# Altium schematic symbol library Chris_R.SchLib: 94 symbols (part 2 of 3)
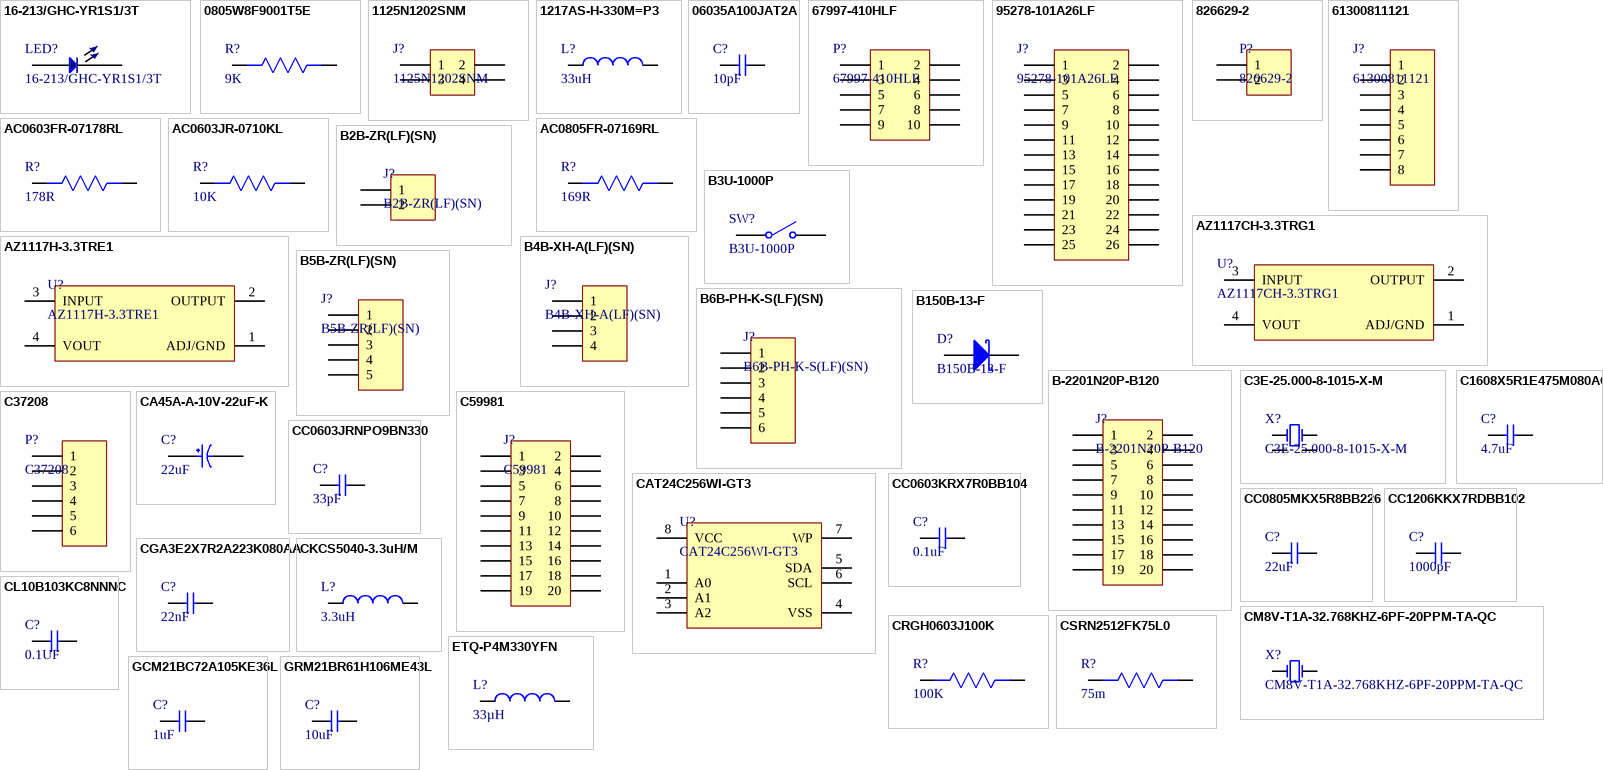
[diagram p3: symbols 16-213/GHC-YR1S1/3T to GRM21BR61H106ME43L]

## GCM21BC72A105KE36L
designator C?, comment 1uF
CAP CER 1UF 100V X7S 0805; Manufacturer: Murata; Manufacturer Part Number: GCM21BC72A105KE36L; Tolerance: 10%; Supplier 1: Digi-Key; RoHS: Yes; Category: Ceramic Capacitors; Stock 1: 179138; Pricing 1: 1=0.48000, 10=0.34100, 50=0.25800, 100=0.22480, 500=0.16650, 1000=0.14152 (USD); Mount: Surface Mount; Case/Package: 0805; Case Code (Imperial): 0805; Case Code (Metric): 2012; Min Operating Temperature: -55°C; Max Operating Temperature: 125°C; Packaging: Cut Tape; Capacitance: 1uF; Voltage Rating: 100V; Ratings: AEC-Q200; RoHS Compliant: Yes; ComponentLink1URL: http://search.murata.co.jp/Ceramy/image/img/A01X/partnumbering_e_02.pdf?src-supplier=Digi-Key; ComponentLink1Description: http://search.murata.co.jp/Ceramy/image/img/A01X/partnumbering_e_02.pdf?src-supplier=Digi-Key; Supplier Part Number 1: 490-14436-1-ND
footprint Cap0805 (SMD 0805)
pins: 1, 2

## GRM21BR61H106ME43L
designator C?, comment 10uF
CAP CER 10UF 50V X5R 0805; Manufacturer: Murata; Manufacturer Part Number: GRM21BR61H106ME43L; Supplier 1: Digi-Key; RoHS: Yes; Category: Ceramic Capacitors; Stock 1: 26; Pricing 1: 1=0.44000, 10=0.30700, 50=0.21500, 100=0.18420, 500=0.13818, 1000=0.11668 (USD); Supplier Part Number 1: 490-18664-1-ND
footprint Cap0805 (SMD 0805)
pins: 1, 2

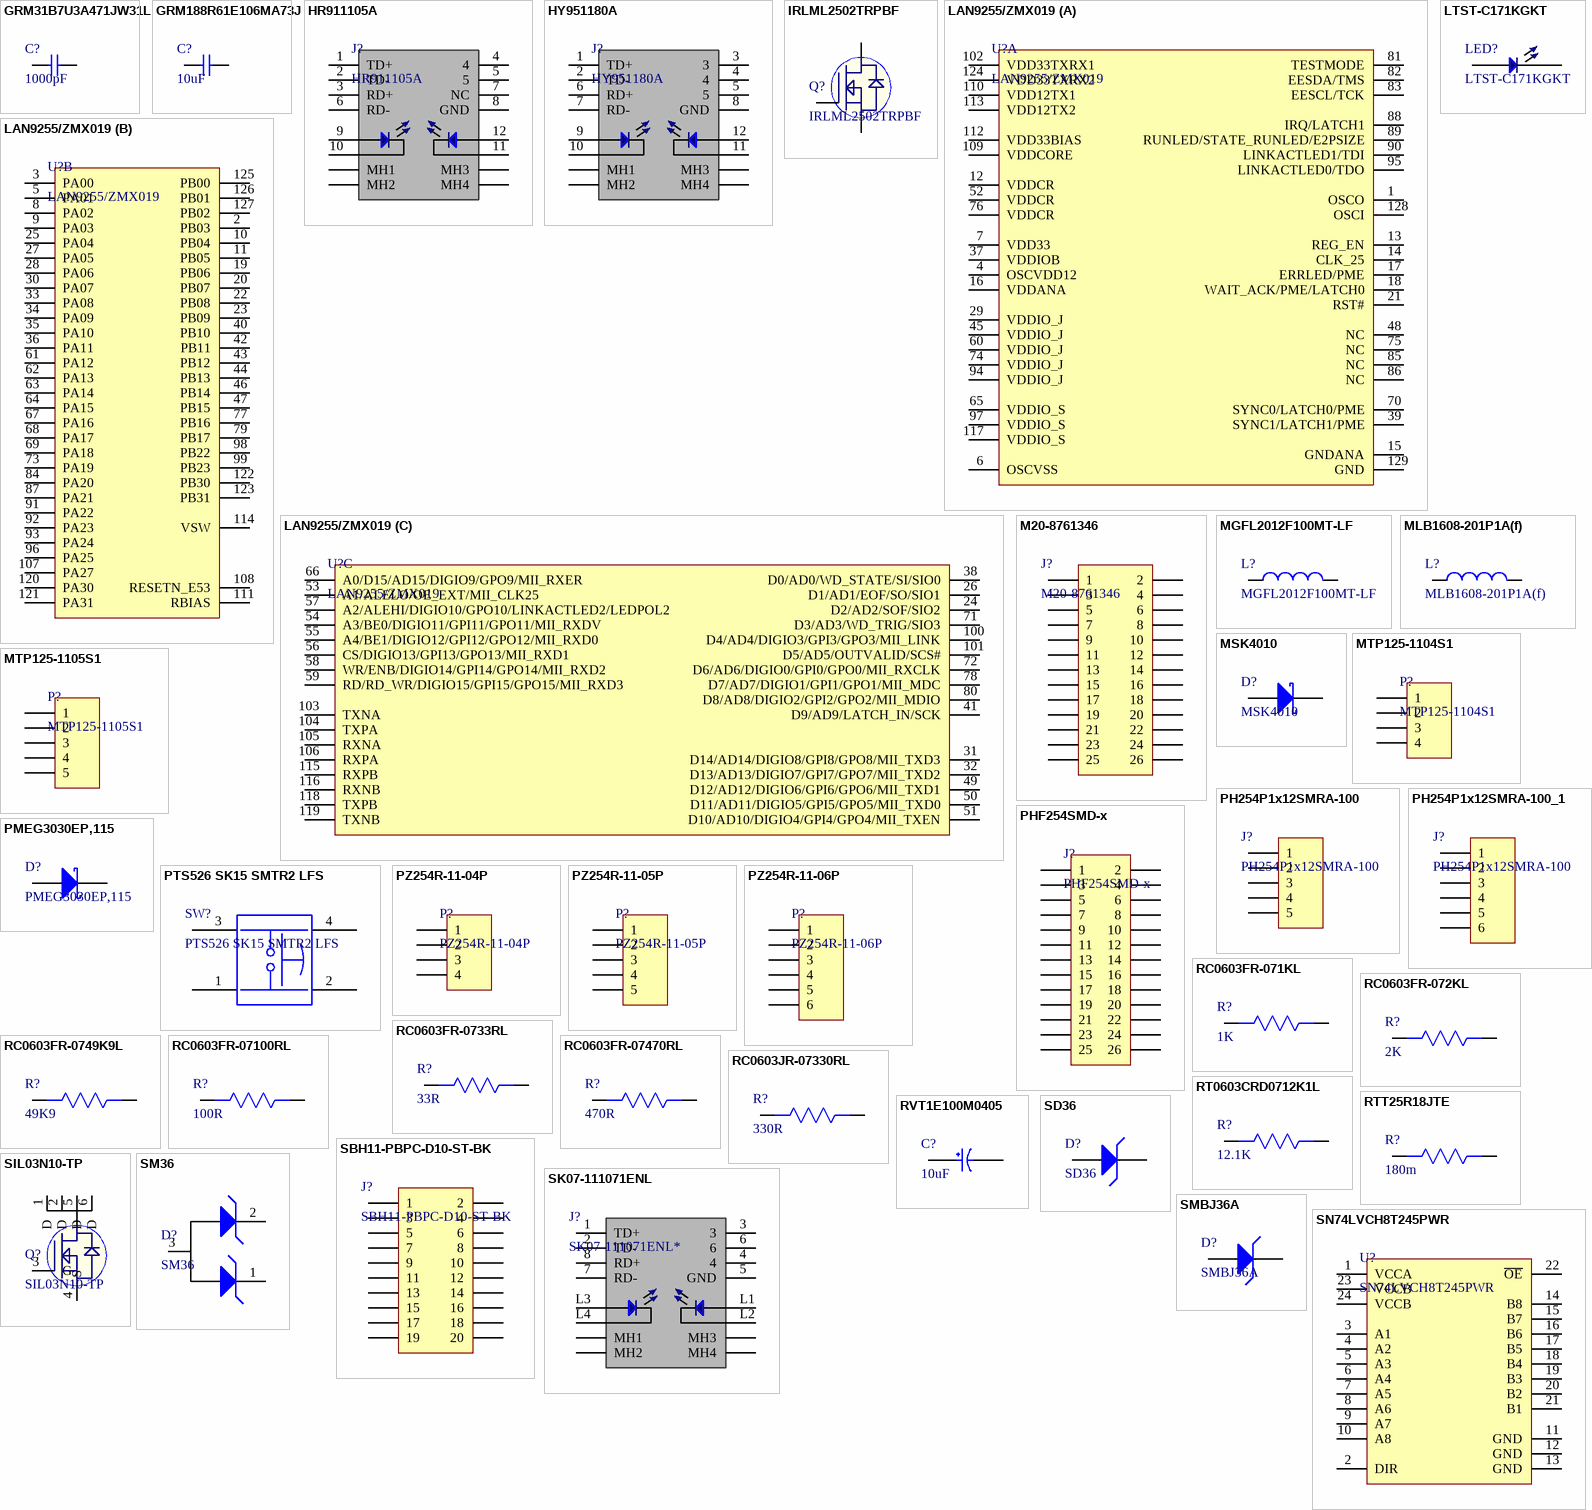
[diagram p1: symbols GRM31B7U3A471JW31L to SN74LVCH8T245PWR]

## GRM31B7U3A471JW31L
designator C?, comment 1000pF
CAP CER 1000 pF, 100 V, 0805 SMD; Manufacturer: Samsung; Manufacturer Part Number: CL21B102KCANNNC; Material: Ceramic; Tolerance: 10%; Capacitance: 1nF; Dielectric: X7R; Voltage Rating: 100V; ComponentLink1URL: https://datasheet.ciiva.com/139/partnumbering-e-01-139909.pdf?src-supplier=Digi-Key; ComponentLink1Description: https://datasheet.ciiva.com/139/partnumbering-e-01-139909.pdf?src-supplier=Digi-Key; ComponentLink2URL: https://datasheet.ciiva.com/139/partnumbering-e-01-139910.pdf?src-supplier=Digi-Key; ComponentLink2Description: https://datasheet.ciiva.com/139/partnumbering-e-01-139910.pdf?src-supplier=Digi-Key; ComponentLink3URL: https://datasheet.ciiva.com/139/partnumbering-e-01-139911.pdf?src-supplier=Digi-Key; ComponentLink3Description: https://datasheet.ciiva.com/139/partnumbering-e-01-139911.pdf?src-supplier=Digi-Key; Supplier 1: Digi-Key; RoHS: Yes; Category: Ceramic Capacitors; Stock 1: 515979; Pricing 1: 1=0.10000, 10=0.05000, 50=0.02700, 100=0.02210, 500=0.01578, 1000=0.01240 (USD); Mount: Surface Mount; Case/Package: 0805; Case Code (Metric): 2012; Case Code (Imperial): 0805; Min Operating Temperature: -55°C; Max Operating Temperature: 125°C; Package Quantity: 1; Packaging: Tape and Reel; Voltage: 100V; Voltage Rating (DC): 100V; Series: CL; Construction: Flat; Length: 2mm; Width: 0.049inch; Height: 0.65mm; Depth: 1.25mm; Thickness: 0.03inch; Radiation Hardening: No; Lead Free: Lead Free; RoHS Compliant: Yes; ComponentLink4URL: https://datasheet.ciiva.com/26878/getdatasheetpartid-643098-26878049.pdf?src-supplier=Verical; ComponentLink4Description: https://datasheet.ciiva.com/26878/getdatasheetpartid-643098-26878049.pdf?src-supplier=Verical; ComponentLink5URL: https://datasheet.ciiva.com/29199/456063-da-01-en-vs-kondensator-0805-29199067.pdf?src-supplier=Conrad; ComponentLink5Description: https://datasheet.ciiva.com/29199/456063-da-01-en-vs-kondensator-0805-29199067.pdf?src-supplier=Conrad; ComponentLink6URL: https://datasheet.ciiva.com/26310/mlcc-catalogdownload2013-eng-26310183.pdf?src-supplier=Distrelec; ComponentLink6Description: https://datasheet.ciiva.com/26310/mlcc-catalogdownload2013-eng-26310183.pdf?src-supplier=Distrelec; Supplier Part Number 1: 1276-1169-1-ND
footprint Cap0805 (SMD 0805)
pins: 1, 2

## GRM188R61E106MA73J
designator C?, comment 10uF
CAP CER 10UF 25V X5R 0603; Manufacturer: Murata; Manufacturer Part Number: GRM188R61E106MA73J; Tolerance: 20%; Supplier 1: Digi-Key; Stock 1: 47597; Pricing 1: 1=0.42, 10=0.293, 100=0.1756, 500=0.13172, 1000=0.11123, 2500=0.10537, 5000=0.09952 (USD); Mount: Surface Mount; Case/Package: 0603; Weight: 0.000222oz; Case Code (Metric): 1608; Case Code (Imperial): 0603; Min Operating Temperature: -55°C; Max Operating Temperature: 85°C; Packaging: Tape and Reel; Capacitance: 10uF; Voltage Rating: 25V; Dielectric: X5R; Termination: SMD/SMT; Composition: Ceramic; Voltage Rating (DC): 25V; Package Quantity: 10000; Length: 0.063inch; Height: 0.8mm; Width: 0.031inch; Thickness: 0.039inch; Supplier Part Number 1: 490-12737-1-ND
footprint Cap0603
pins: 1, 2

## HR911105A
designator J?
MODULAR JACK THT R/A 8P8C (RJ45,Ethernet) GRAY; Manufacturer: HANRUN; Manufacturer Part No: HR911105A; Package: Custom; Value: *
footprint HR911105A
pins: 1 TD+, 2 TD-, 3 RD+, 4, 5, 6 RD-, 7 NC, 8 GND, 9 ANODE , 10 CATHODE, 11 CATHODE, 12 ANODE , MH1, MH2, MH3, MH4

## HY951180A
designator J?
Through Hole Ethernet Connectors/Modular Connectors (RJ45 RJ11) ROHS; Manufacturer: HANRUN; Manufacturer Part No: HY951180A; Package: Custom; Value: *
footprint HY951180A
pins: 1 TD+, 2 TD-, 3, 4, 5, 6 RD+, 7 RD-, 8 GND, 9 ANODE , 10 CATHODE, 11 CATHODE, 12 ANODE , MH1, MH2, MH3, MH4

## IRLML2502TRPBF
designator Q?
MOSFET N-CH 20V 4.2A SOT23; Manufacturer: International Rectifier; Rise Time: 10ns; Max Power Dissipation: 1.25W; Gate to Source Voltage (Vgs): 12V; Turn-On Delay Time: 7.5ns; Turn-Off Delay Time: 54ns; Fall Time: 26ns; Threshold Voltage: 1.2V; Rds On Max: 45mR; Input Capacitance: 740pF; Number of Elements: 1; Element Configuration: Single; Supplier 1: Newark; Manufacturer Part Number: IRLML2502TRPBF; RoHS: Yes; Category: MOSFETs; Mount: Surface Mount; Case/Package: SOT-23; Number of Pins: 3; Min Operating Temperature: -55°C; Max Operating Temperature: 150°C; Continuous Drain Current (ID): 4.2A; Drain to Source Voltage (Vdss): 20V; Packaging: Tape and Reel; Package Quantity: 3000; Nominal Vgs: 1.2V; Dual Supply Voltage: 20V; Drain to Source Breakdown Voltage: 20V; Drain to Source Resistance: 45mR; Power Dissipation: 1.25W; Termination: SMD/SMT; Voltage Rating (DC): 20V; Current Rating: 4.2A; On-State Resistance: 45mR; Drain-source On Resistance-Max: 45mR; Length: 2.8mm; Width: 1.4mm; Height: 1.02mm; Radiation Hardening: No; REACH SVHC: No SVHC; Lead Free: Lead Free; ComponentLink1URL: https://datasheet.ciiva.com/36526/1563649-36526014.pdf?src-supplier=Jameco; ComponentLink1Description: https://datasheet.ciiva.com/36526/1563649-36526014.pdf?src-supplier=Jameco; ComponentLink2URL: https://datasheet.ciiva.com/16425/irlml2502pbf-16425943.pdf?src-supplier=Future+Electronics; ComponentLink2Description: https://datasheet.ciiva.com/16425/irlml2502pbf-16425943.pdf?src-supplier=Future+Electronics; ComponentLink3URL: https://datasheet.ciiva.com/6156/irlml2502-6156070.pdf?src-supplier=Farnell; ComponentLink3Description: https://datasheet.ciiva.com/6156/irlml2502-6156070.pdf?src-supplier=Farnell; ComponentLink4URL: https://datasheet.ciiva.com/7935/irlml2502-7935685.pdf?src-supplier=Element14; ComponentLink4Description: https://datasheet.ciiva.com/7935/irlml2502-7935685.pdf?src-supplier=Element14; Supplier Part Number 1: 11X6741
footprint IRLML2502TRPBF (MOSFET N-CH 20V 4.2A SOT23)
pins: 1 G, 2 S, 3 D

## LAN9255/ZMX019
designator U?
IC ETHERCAT SLAVE CONTROLLER; Manufacturer: Microchip; Manufacturer Part Number: LAN9255-I/ZMX019; Supplier 1: Digi-Key; Stock 1: 70; Pricing 1: 1=17.76000, 25=16.18480 (USD); Supplier Part Number 1: 150-LAN9255-I/ZMX019-ND
footprint LAN9255/ZMX019
part A pins: 1 OSCO, 4 OSCVDD12, 6 OSCVSS, 7 VDD33, 12 VDDCR, 13 REG_EN, 14 CLK_25, 15 GNDANA, 16 VDDANA, 17 ERRLED/PME, 18 WAIT_ACK/PME/LATCH0, 21 RST#, 29 VDDIO_J, 37 VDDIOB, 39 SYNC1/LATCH1/PME, 45 VDDIO_J, 48 NC, 52 VDDCR, 60 VDDIO_J, 65 VDDIO_S, 70 SYNC0/LATCH0/PME, 74 VDDIO_J, 75 NC, 76 VDDCR, 81 TESTMODE, 82 EESDA/TMS, 83 EESCL/TCK, 85 NC, 86 NC, 88 IRQ/LATCH1, 89 RUNLED/STATE_RUNLED/E2PSIZE, 90 LINKACTLED1/TDI, 94 VDDIO_J, 95 LINKACTLED0/TDO, 97 VDDIO_S, 102 VDD33TXRX1, 109 VDDCORE, 110 VDD12TX1, 112 VDD33BIAS, 113 VDD12TX2, 117 VDDIO_S, 124 VDD33TXRX2, 128 OSCI, 129 GND
part B pins: 2 PB03, 3 PA00, 5 PA01, 8 PA02, 9 PA03, 10 PB04, 11 PB05, 19 PB06, 20 PB07, 22 PB08, 23 PB09, 25 PA04, 27 PA05, 28 PA06, 30 PA07, 33 PA08, 34 PA09, 35 PA10, 36 PA11, 40 PB10, 42 PB11, 43 PB12, 44 PB13, 46 PB14, 47 PB15, 61 PA12, 62 PA13, 63 PA14, 64 PA15, 67 PA16, 68 PA17, 69 PA18, 73 PA19, 77 PB16, 79 PB17, 84 PA20, 87 PA21, 91 PA22, 92 PA23, 93 PA24, 96 PA25, 98 PB22, 99 PB23, 107 PA27, 108 RESETN_E53, 111 RBIAS, 114 VSW, 120 PA30, 121 PA31, 122 PB30, 123 PB31, 125 PB00, 126 PB01, 127 PB02
part C pins: 24 D2/AD2/SOF/SIO2, 26 D1/AD1/EOF/SO/SIO1, 31 D14/AD14/DIGIO8/GPI8/GPO8/MII_TXD3, 32 D13/AD13/DIGIO7/GPI7/GPO7/MII_TXD2, 38 D0/AD0/WD_STATE/SI/SIO0, 41 D9/AD9/LATCH_IN/SCK, 49 D12/AD12/DIGIO6/GPI6/GPO6/MII_TXD1, 50 D11/AD11/DIGIO5/GPI5/GPO5/MII_TXD0, 51 D10/AD10/DIGIO4/GPI4/GPO4/MII_TXEN, 53 A1/ALELO/OE_EXT/MII_CLK25, 54 A3/BE0/DIGIO11/GPI11/GPO11/MII_RXDV, 55 A4/BE1/DIGIO12/GPI12/GPO12/MII_RXD0, 56 CS/DIGIO13/GPI13/GPO13/MII_RXD1, 57 A2/ALEHI/DIGIO10/GPO10/LINKACTLED2/LEDPOL2, 58 WR/ENB/DIGIO14/GPI14/GPO14/MII_RXD2, 59 RD/RD_WR/DIGIO15/GPI15/GPO15/MII_RXD3, 66 A0/D15/AD15/DIGIO9/GPO9/MII_RXER, 71 D3/AD3/WD_TRIG/SIO3, 72 D6/AD6/DIGIO0/GPI0/GPO0/MII_RXCLK, 78 D7/AD7/DIGIO1/GPI1/GPO1/MII_MDC, 80 D8/AD8/DIGIO2/GPI2/GPO2/MII_MDIO, 100 D4/AD4/DIGIO3/GPI3/GPO3/MII_LINK, 101 D5/AD5/OUTVALID/SCS#, 103 TXNA, 104 TXPA, 105 RXNA, 106 RXPA, 115 RXPB, 116 RXNB, 118 TXPB, 119 TXNB

## LTST-C171KGKT
designator LED?
Standard LEDs - SMD Green Clear 571nm; Manufacturer: Vishay Lite-On; Lens Color: Colorless; Viewing Angle: 130°; Lens Style: Rectangular,Diffused,Colorless,Clear; Forward Voltage: 2.4V; Forward Current: 30mA; Luminous Intensity: 35mcd; Test Current: 20mA; Number of Elements: 1; Power Dissipation: 75mW; Wavelength: 574nm; Reverse Voltage: 5V; Supplier 1: RSComponents; Manufacturer Part Number: LTST-C171KGKT; RoHS: Yes; Category: LEDs; Stock 1: 21500; Pricing 1: 250=0.05900, 500=0.05000, 1250=0.04200, 2500=0.03900 (GBP); Mount: Surface Mount; Case/Package: 0805; Number of Pins: 2; Color: Green; Case Code (Metric): 2012; Case Code (Imperial): 0805; Min Operating Temperature: -55°C; Max Operating Temperature: 85°C; Packaging: Tape and Reel; Package Quantity: 1; Illumination Color: Green; Dominant Wavelength: 571nm; Lens Transparency: Clear; Number of LEDs: 1; Power Rating: 75mW; Series: CHIPLED 0805; Length: 2mm; Width: 1.25mm; Height: 0.8mm; Depth: 1.25mm; Radiation Hardening: No; Lead Free: Lead Free; RoHS Compliant: Yes; ComponentLink1URL: https://datasheet.ciiva.com/11774/0900766b80dc0298-11774377.pdf?src-supplier=RSComponents; ComponentLink1Description: https://datasheet.ciiva.com/11774/0900766b80dc0298-11774377.pdf?src-supplier=RSComponents; ComponentLink2URL: https://datasheet.ciiva.com/12400/lite-on-ltst-c171kgkt-187692-12400799.pdf?src-supplier=Mouser; ComponentLink2Description: https://datasheet.ciiva.com/12400/lite-on-ltst-c171kgkt-187692-12400799.pdf?src-supplier=Mouser; ComponentLink3URL: https://datasheet.ciiva.com/16200/lite-on20ltst-c171kgkt-16200100.pdf?src-supplier=Future+Electronics; ComponentLink3Description: https://datasheet.ciiva.com/16200/lite-on20ltst-c171kgkt-16200100.pdf?src-supplier=Future+Electronics; ComponentLink4URL: https://datasheet.ciiva.com/15118/getdatasheetpartid-214542-15118099.pdf?src-supplier=Verical; ComponentLink4Description: https://datasheet.ciiva.com/15118/getdatasheetpartid-214542-15118099.pdf?src-supplier=Verical; ComponentLink5URL: https://datasheet.ciiva.com/2110/s-110-ltst-c171kgkt-2110073.pdf?src-supplier=Digi-Key; ComponentLink5Description: https://datasheet.ciiva.com/2110/s-110-ltst-c171kgkt-2110073.pdf?src-supplier=Digi-Key; ComponentLink6URL: https://datasheet.ciiva.com/2110/s-110-ltst-c171kgkt-2110072.pdf?src-supplier=Digi-Key; ComponentLink6Description: https://datasheet.ciiva.com/2110/s-110-ltst-c171kgkt-2110072.pdf?src-supplier=Digi-Key; ComponentLink7URL: https://datasheet.ciiva.com/2110/s-110-ltst-c171kgkt-2110074.pdf?src-supplier=Digi-Key; ComponentLink7Description: https://datasheet.ciiva.com/2110/s-110-ltst-c171kgkt-2110074.pdf?src-supplier=Digi-Key; Supplier Part Number 1: 6920947P
footprint LED 0805 (SMD 0805)
pins: 1, 2

## M20-8761346
designator J?
CONN HEADER SMD 26POS 2.54MM; Manufacturer: Harwin; Number of Positions: 26; Gender: Male; Connector Type: Male Pin; Max Current Rating: 3A; Contact Resistance: 30mR; Row Spacing: 0.1inch; Supplier 1: Mouser; Manufacturer Part Number: M20-8761346; RoHS: Yes; Category: Headers and Wire Housings; Stock 1: 1883; Pricing 1: 1=1.31000, 10=1.06000, 50=1.06000, 100=0.94100, 1000=0.71800, 10000=0.59700 (USD); Mount: Surface Mount; Contact Plating: Tin; Color: Black; Contact Material: Brass; Housing Color: Black; Housing Material: Nylon; Min Operating Temperature: -40°C; Max Operating Temperature: 105°C; Package Quantity: 500; Number of Rows: 2; Packaging: Bag; Termination: Solder; Series: M20; Contact Type: Male Pin; Orientation: Straight; Length: 33.02mm; Pitch: 2.54mm; Contact Mating Length: 0.228inch; Depth: 5.08mm; RoHS Compliant: Yes; ComponentLink1URL: http://components.arrow.com/part/dataview/0323_00728928?src-supplier=Arrow+Europe; ComponentLink1Description: http://components.arrow.com/part/dataview/0323_00728928?src-supplier=Arrow+Europe; ComponentLink2URL: http://www.mouser.com/ds/2/181/M20-876-1135613.pdf?src-supplier=Mouser; ComponentLink2Description: http://www.mouser.com/ds/2/181/M20-876-1135613.pdf?src-supplier=Mouser; ComponentLink3URL: https://cdn.harwin.com/pdfs/M20-876.pdf?src-supplier=Digi-Key; ComponentLink3Description: https://cdn.harwin.com/pdfs/M20-876.pdf?src-supplier=Digi-Key; Supplier Part Number 1: 855-M20-8761346
pins: 1, 2, 3, 4, 5, 6, 7, 8, 9, 10, 11, 12, 13, 14, 15, 16, 17, 18, 19, 20, 21, 22, 23, 24, 25, 26

## MGFL2012F100MT-LF
designator L?
IND SMD 10uH 500mA 0805; Manufacturer: microgate; Tolerance: ±20%; DC Resistance (DCR): 320mΩ; Inductance: 10uH; Rated Current: 500mA
footprint Ind0805 (Inductor 0805)
pins: 1, 2

## MLB1608-201P1A(f)
designator L?
200Ω @ 100MHz 1 1A 300mΩ 0603 Ferrite Beads; Manufacturer: Meled; Number of Lines: 1; Impedance @ Frequency: 200Ω @ 100MHz; Current Rating (Max): 1A; DC Resistance (DCR) (Max): 300mΩ; ComponentLink1Description: LCSC; ComponentLink1URL: https://www.lcsc.com/product-detail/Ferrite-Beads_Meled-MLB1608-201P1A-f_C45316.html
footprint MLB1608-201P1A(f) (200O @ 100MHz 1 1A 300mO 0603 Ferrite Beads)
pins: 1, 2

## MSK4010
designator D?
SOD-523 Schottky Barrier Diodes (SBD) ROHS; Manufacturer: Tak Cheong; Value: Custom; Manufacturer Part No: MSK4010; Pakage: SOD-523; ComponentLink1Description: LCSC; ComponentLink1URL: https://lcsc.com/product-detail/Schottky-Barrier-Diodes-SBD_Tak-Cheong-MSK4010_C968723.html
footprint MSK4010 (SOD-523 Schottky Barrier Diodes (SBD) ROHS)
pins: 1 A, 2 K

## MTP125-1104S1
designator P?
2.54mm Straight 1 4 Header TH,P=2.54mm Pin Headers ROHS; Manufacturer: MINTRON; Value: Custom; Manufacturer Part No: MTP125-1104S1; Package: Custom; ComponentLink1Description: LCSC; ComponentLink1URL: https://lcsc.com/product-detail/Pin-Headers_MINTRON-MTP125-1104S1_C358686.html
footprint HDR1X4 (Connector; Header; 4 Position)
pins: 1, 2, 3, 4

## MTP125-1105S1
designator P?
2.54mm Straight 1 Header TH ,P=2.54mm Pin Headers ROHS; Manufacturer: MINTRON; Value: Custom; Manufacturer Part No: MTP125-1105S1; Package: Custom; ComponentLink1Description: LCSC; ComponentLink1URL: https://lcsc.com/product-detail/Pin-Headers_MINTRON-MTP125-1105S1_C358687.html
footprint HDR1X5 (Connector; Header; 5 Position)
pins: 1, 2, 3, 4, 5

## PH254P1x12SMRA-100
designator J?
5 POS 2.54mm Pin Header Male single row Right Angle SMD; Manufacturer: RTLECS; Pin shape: Square pin; Pitch: 2.54
footprint HDR1X5 SMD
pins: 1, 2, 3, 4, 5

## PH254P1x12SMRA-100_1
designator J?, comment PH254P1x12SMRA-100
6 POS 2.54mm Pin Header Male single row Right Angle SMD; Manufacturer: RTLECS; Pin shape: Square pin; Pitch: 2.54
footprint HDR1X6 SMD
pins: 1, 2, 3, 4, 5, 6

## PHF254SMD-x
designator J?
P=2.54mm Female Headers,SMD,ROHS; Manufacturer: RTLECS; Manufacturer Part no:: PHF254SMD-x; Package: Custom; Value: *
footprint PHF254SMD-x
pins: 1, 2, 3, 4, 5, 6, 7, 8, 9, 10, 11, 12, 13, 14, 15, 16, 17, 18, 19, 20, 21, 22, 23, 24, 25, 26

## PMEG3030EP,115
designator D?
Diode Schottky 30V 3A 2-Pin SOD-128 T/R; Manufacturer: NXP Semiconductors; Manufacturer Part Number: PMEG3030EP-115; Max Reverse Current: 1.5mA; Peak Non-Repetitive Surge Current: 50A; Element Configuration: Single; Forward Voltage: 360mV; Power Dissipation: 625mW; Supplier 1: Newark; RoHS: Yes; Category: Rectifier Diodes; Mount: Surface Mount; Number of Pins: 2; Min Operating Temperature: -55°C; Max Operating Temperature: 150°C; Forward Current: 3A; Max Repetitive Reverse Voltage (Vrrm): 30V; Package Quantity: 1; Max Surge Current: 50A; Packaging: Tape and Reel; Average Rectified Current: 3A; Reverse Voltage: 30V; Max Reverse Voltage (DC): 30V; Series: -; Radiation Hardening: No; Lead Free: Lead Free; ComponentLink1URL: https://datasheet.ciiva.com/4453/pmeg3030ep-103074-4453360.pdf?src-supplier=Mouser; ComponentLink1Description: https://datasheet.ciiva.com/4453/pmeg3030ep-103074-4453360.pdf?src-supplier=Mouser; ComponentLink2URL: https://datasheet.ciiva.com/8299/pmeg3030ep-8299156.pdf?src-supplier=Avnet; ComponentLink2Description: https://datasheet.ciiva.com/8299/pmeg3030ep-8299156.pdf?src-supplier=Avnet; ComponentLink3URL: https://datasheet.ciiva.com/917/pmeg3030ep-917049.pdf?src-supplier=Digi-Key; ComponentLink3Description: https://datasheet.ciiva.com/917/pmeg3030ep-917049.pdf?src-supplier=Digi-Key; ComponentLink4URL: https://datasheet.ciiva.com/917/pmeg3030ep-917048.pdf?src-supplier=Digi-Key; ComponentLink4Description: https://datasheet.ciiva.com/917/pmeg3030ep-917048.pdf?src-supplier=Digi-Key; ComponentLink5URL: https://datasheet.ciiva.com/917/pmeg3030ep-917050.pdf?src-supplier=Digi-Key; ComponentLink5Description: https://datasheet.ciiva.com/917/pmeg3030ep-917050.pdf?src-supplier=Digi-Key; ComponentLink6URL: https://datasheet.ciiva.com/8299/pmeg3030ep-8299301.pdf?src-supplier=Avnet; ComponentLink6Description: https://datasheet.ciiva.com/8299/pmeg3030ep-8299301.pdf?src-supplier=Avnet; Supplier Part Number 1: 85W3397
footprint PMEG3030EP,115 (DIODE SCHOTTKY 30V 3A CFP5)
pins: 1 A, 2 K

## PTS526 SK15 SMTR2 LFS
designator SW?
TACT 5.2 X 5.2, 1.5 MM H, 260GF,; Manufacturer: ITT C&K; Supplier 1: Digi-Key; Manufacturer Part Number: PTS526SK15SMTR2LFS; RoHS: No; Category: Tactile Switches; Stock 1: 73068; Pricing 1: 1=0.11000, 10=0.10900, 25=0.10280, 100=0.09360, 250=0.08800, 500=0.08052, 1000=0.06741 (USD); Supplier Part Number 1: CKN12221-1-ND
footprint PTS526 SK15 SMTR2 LFS
pins: 1, 2, 3, 4

## PZ254R-11-04P
designator P?
Header，Breakaway 4 Shrouded 1 2.54mm Through Hole,P=2.54mm Pin Headers ROHS; Manufacturer: XFCN; Manufacturer Part No: PZ254-11-04P; Value: 4-PIN; Package: THROUGH HOLE 2.54MM; ComponentLink1Description: LCSC; ComponentLink1URL: https://lcsc.com/product-detail/Pin-Headers_MINTRON-MTP125-1104S1_C358686.html
footprint HDR1X4 (Connector; Header; 4 Position)
pins: 1, 2, 3, 4

## PZ254R-11-05P
designator P?
Header, Breakaway 5 Shrouded 1 2.54mm Through Hole,P=2.54mm Pin Headers ROHS; Manufacturer: XFCN; Value: 5-PIN; Manufacturer Part No: PZ254R-11-05P; Package: THROUGH HOLE 2.54MM; ComponentLink1Description: LCSC; ComponentLink1URL: https://lcsc.com/product-detail/Pin-Headers_MINTRON-MTP125-1105S1_C358687.html
footprint HDR1X5 (Connector; Header; 5 Position)
pins: 1, 2, 3, 4, 5

## PZ254R-11-06P
designator P?
Header，Breakaway 6 Shrouded 1 2.54mm Through Hole,P=2.54mm Pin Headers ROHS; Manufacturer: XFCN; Value: 6-PIN; Manufacturer Part No: PZ254R-11-06P; Package: THROUGH HOLE 2.54MM; ComponentLink1Description: LCSC; ComponentLink1URL: https://lcsc.com/product-detail/Pin-Headers_MINTRON-MTP125-1105S1_C358687.html
footprint HDR1X6 (Connector; Header; 6 Position)
pins: 1, 2, 3, 4, 5, 6

## RC0603FR-071KL
designator R?, comment 1K
RES SMD 1K OHM 1% 1/10W 0603; Manufacturer: Yageo; Manufacturer Part Number: RC0603FR-071KL; Resistance: 1kR; Temperature Coefficient: 100ppm/°C; Power Rating: 100mW; Voltage Rating: 50V; ComponentLink1URL: https://www.verical.com/server-webapp/html/getDatasheet?partID=409289&src-supplier=Verical; ComponentLink1Description: https://www.verical.com/server-webapp/html/getDatasheet?partID=409289&src-supplier=Verical; Supplier 1: Digi-Key; Stock 1: 21472395; Pricing 1: 1=0.1, 10=0.023, 100=0.0094, 1000=0.0042, 2500=0.0037 (USD); Case/Package: 0603; Contact Plating: Tin,Matte; Case Code (Imperial): 0603; Case Code (Metric): 1608; Min Operating Temperature: -55°C; Max Operating Temperature: 155°C; Tolerance: 1%; Composition: Thick Film; Packaging: Tape and Reel; Termination: SMD/SMT; Military Standard: Not; Length: 1.6mm; Height: 0.45mm; Depth: 0.8mm; Radiation Hardening: No; REACH SVHC: No SVHC; Lead Free: Lead Free; ComponentLink2URL: http://documents.rs-components.com/techlib://itc_doclist_GB.htm?stockno=5048928&src-supplier=RSComponents; ComponentLink2Description: http://documents.rs-components.com/techlib://itc_doclist_GB.htm?stockno=5048928&src-supplier=RSComponents; ComponentLink3URL: http://www.yageo.com/documents/recent/PYu-RC0603_51_RoHS_L_4.pdf?src-supplier=Avnet+Europe; ComponentLink3Description: http://www.yageo.com/documents/recent/PYu-RC0603_51_RoHS_L_4.pdf?src-supplier=Avnet+Europe; ComponentLink4URL: http://www.farnell.com/datasheets/2167052.pdf?src-supplier=Element14; ComponentLink4Description: http://www.farnell.com/datasheets/2167052.pdf?src-supplier=Element14; ComponentLink5URL: http://www.farnell.com/datasheets/1868787.pdf?src-supplier=Element14; ComponentLink5Description: http://www.farnell.com/datasheets/1868787.pdf?src-supplier=Element14; ComponentLink6URL: http://www.yageo.com/documents/recent/PYu-RC_Group_51_RoHS_L_2.pdf?src-supplier=Avnet; ComponentLink6Description: http://www.yageo.com/documents/recent/PYu-RC_Group_51_RoHS_L_2.pdf?src-supplier=Avnet; ComponentLink7URL: https://www.verical.com/server-webapp/html/getDatasheet?partID=404327&src-supplier=Verical; ComponentLink7Description: https://www.verical.com/server-webapp/html/getDatasheet?partID=404327&src-supplier=Verical; ComponentLink8URL: http://www.farnell.com/datasheets/443971.pdf?src-supplier=Element14; ComponentLink8Description: http://www.farnell.com/datasheets/443971.pdf?src-supplier=Element14; Supplier Part Number 1: 311-1.00KHRDKR-ND
footprint Res0603
pins: 1, 2

## RC0603FR-072KL
designator R?, comment 2K
RES SMD 2K OHM 1% 1/10W 0603; Manufacturer: Yageo; Manufacturer Part Number: RC0603FR-072KL; Resistance: 2kR; Temperature Coefficient: 100ppm/°C; Voltage Rating (DC): 50V; Power Rating: 100mW; Working Voltage: 75V; Supplier 1: Digi-Key; Stock 1: 8782961; Pricing 1: 1=0.1, 10=0.023, 100=0.0094, 1000=0.00421, 2500=0.00366 (USD); Case/Package: 0603; Number of Pins: 2; Case Code (Metric): 1608; Case Code (Imperial): 0603; Min Operating Temperature: -55°C; Max Operating Temperature: 155°C; Tolerance: 1%; Composition: Thick Film; Packaging: Tape and Reel; Voltage Rating: 50V; Package Quantity: 1; Number of Terminations: 2; Termination: SMD/SMT; Military Standard: Not; Max Power Dissipation: 100mW; Features: Moisture Resistant; Length: 1.6mm; Height: 0.45mm; Width: 0.031inch; Depth: 0.8mm; Lead Free: Lead Free; REACH SVHC: No SVHC; ComponentLink1URL: http://www.farnell.com/datasheets/2167052.pdf?src-supplier=Element14; ComponentLink1Description: http://www.farnell.com/datasheets/2167052.pdf?src-supplier=Element14; ComponentLink2URL: http://documents.rs-components.com/techlib://itc_doclist_GB.htm?stockno=5050139&src-supplier=RSComponents; ComponentLink2Description: http://documents.rs-components.com/techlib://itc_doclist_GB.htm?stockno=5050139&src-supplier=RSComponents; ComponentLink3URL: http://www.yageo.com/documents/recent/PYu-RC_Group_51_RoHS_L_10.pdf?src-supplier=Digi-Key; ComponentLink3Description: http://www.yageo.com/documents/recent/PYu-RC_Group_51_RoHS_L_10.pdf?src-supplier=Digi-Key; ComponentLink4URL: http://www.mouser.com/catalog/specsheets/RC0603.pdf?src-supplier=Mouser; ComponentLink4Description: http://www.mouser.com/catalog/specsheets/RC0603.pdf?src-supplier=Mouser; Supplier Part Number 1: 311-2.00KHRCT-ND
footprint Res0603
pins: 1, 2

## RC0603FR-0733RL
designator R?, comment 33R
RES SMD 0603 33 Ohm 1% 1/10W; Manufacturer: Yageo; Manufacturer Part Number: RC0603FR-0733RL; Temperature Coefficient: 100ppm/°C; Voltage Rating (DC): 50V; Power Rating: 100mW; Voltage Rating: 75V; Supplier 1: Digi-Key; RoHS: Yes; Category: Chip SMD Resistors; Stock 1: 41; Pricing 1: 1=0.10000, 10=0.02400, 100=0.00970, 1000=0.00436, 2500=0.00378 (USD); Case/Package: 0603; Number of Pins: 2; Case Code (Metric): 1608; Case Code (Imperial): 0603; Weight: 7.1E-05oz; Size Code: 0603; Min Operating Temperature: -55°C; Max Operating Temperature: 155°C; Resistance: 33R; Tolerance: 1%; Resistor Type: Thick Film; Packaging: Tape and Reel; Package Quantity: 1; Number of Terminations: 2; Termination: SMD/SMT; Max Power Dissipation: 100mW; Features: Moisture Resistant; Series: RC; Resistance Tolerance: 1%; Technology: THICK FILM; Construction: Rectangular; Length: 1.6mm; Width: 0.8mm; Height: 0.45mm; Depth: 0.8mm; Lead Pitch: 0.3mm; REACH SVHC: No SVHC; Lead Free: Lead Free; Military Standard: Not; RoHS Compliant: Yes; ComponentLink1URL: https://datasheet.ciiva.com/11808/0900766b80f96399-11808741.pdf?src-supplier=RSComponents; ComponentLink1Description: https://datasheet.ciiva.com/11808/0900766b80f96399-11808741.pdf?src-supplier=RSComponents; ComponentLink2URL: https://datasheet.ciiva.com/2453/pyu-r-int-thick-7-2453952.pdf?src-supplier=Digi-Key; ComponentLink2Description: https://datasheet.ciiva.com/2453/pyu-r-int-thick-7-2453952.pdf?src-supplier=Digi-Key; ComponentLink3URL: https://datasheet.ciiva.com/2453/pyu-r-int-thick-7-2453953.pdf?src-supplier=Digi-Key; ComponentLink3Description: https://datasheet.ciiva.com/2453/pyu-r-int-thick-7-2453953.pdf?src-supplier=Digi-Key; ComponentLink4URL: https://datasheet.ciiva.com/2453/pyu-r-int-thick-7-2453954.pdf?src-supplier=Digi-Key; ComponentLink4Description: https://datasheet.ciiva.com/2453/pyu-r-int-thick-7-2453954.pdf?src-supplier=Digi-Key; ComponentLink5URL: https://datasheet.ciiva.com/7660/38590-7660792.pdf?src-supplier=Element14; ComponentLink5Description: https://datasheet.ciiva.com/7660/38590-7660792.pdf?src-supplier=Element14; ComponentLink6URL: https://datasheet.ciiva.com/15189/getdatasheetpartid-326673-15189708.pdf?src-supplier=Verical; ComponentLink6Description: https://datasheet.ciiva.com/15189/getdatasheetpartid-326673-15189708.pdf?src-supplier=Verical; ComponentLink7URL: https://datasheet.ciiva.com/7746/443971-7746334.pdf?src-supplier=Element14; ComponentLink7Description: https://datasheet.ciiva.com/7746/443971-7746334.pdf?src-supplier=Element14; ComponentLink8URL: https://datasheet.ciiva.com/7746/443971-7746335.pdf?src-supplier=Element14; ComponentLink8Description: https://datasheet.ciiva.com/7746/443971-7746335.pdf?src-supplier=Element14; ComponentLink9URL: https://datasheet.ciiva.com/46395/443971-46395007.pdf?src-supplier=Element14; ComponentLink9Description: https://datasheet.ciiva.com/46395/443971-46395007.pdf?src-supplier=Element14; Supplier Part Number 1: 311-33.0HRCT-ND
footprint Res0603
pins: 1, 2

## RC0603FR-0749K9L
designator R?, comment 49K9
RES 49.9K OHM 1% 1/10W 0603; Manufacturer: Yageo; Manufacturer Part Number: RC0603FR-0749K9L; Power Rating: 100mW; Resistance: 49.9kR; Temperature Coefficient: 100ppm/°C; Voltage Rating (DC): 50V; Supplier 1: Digi-Key; RoHS: Yes; Category: Chip SMD Resistors; Stock 1: 77863; Pricing 1: 1=0.10000, 10=0.02400, 100=0.00970, 1000=0.00436, 2500=0.00378 (USD); Mount: Surface Mount; Case/Package: 0603; Case Code (Metric): 1608; Case Code (Imperial): 0603; Size Code: 0603; Min Operating Temperature: -55°C; Max Operating Temperature: 155°C; Tolerance: 1%; Packaging: Tape and Reel; Package Quantity: 1; Voltage Rating: 50V; Resistor Type: Thick Film; Number of Terminations: 2; Termination: SMD/SMT; Max Power Dissipation: 100mW; Features: Moisture Resistant; Series: RC; Construction: Rectangular; Length: 0.063inch; Width: 0.031inch; Height: 0.022inch; Depth: 0.8mm; Lead Free: Lead Free; Military Standard: Not; RoHS Compliant: Yes; ComponentLink1URL: https://datasheet.ciiva.com/2454/pyu-r-int-thick-7-2454042.pdf?src-supplier=Digi-Key; ComponentLink1Description: https://datasheet.ciiva.com/2454/pyu-r-int-thick-7-2454042.pdf?src-supplier=Digi-Key; ComponentLink2URL: https://datasheet.ciiva.com/2454/pyu-r-int-thick-7-2454043.pdf?src-supplier=Digi-Key; ComponentLink2Description: https://datasheet.ciiva.com/2454/pyu-r-int-thick-7-2454043.pdf?src-supplier=Digi-Key; ComponentLink3URL: https://datasheet.ciiva.com/2454/pyu-r-int-thick-7-2454044.pdf?src-supplier=Digi-Key; ComponentLink3Description: https://datasheet.ciiva.com/2454/pyu-r-int-thick-7-2454044.pdf?src-supplier=Digi-Key; ComponentLink4URL: https://datasheet.ciiva.com/15189/getdatasheetpartid-323805-15189749.pdf?src-supplier=Verical; ComponentLink4Description: https://datasheet.ciiva.com/15189/getdatasheetpartid-323805-15189749.pdf?src-supplier=Verical; Supplier Part Number 1: 311-49.9KHRCT-ND
footprint Res0603
pins: 1, 2

## RC0603FR-07100RL
designator R?, comment 100R
RES SMD 100 OHM 1% 1/10W 0603; Manufacturer: Yageo; Manufacturer Part Number: RC0603FR-07100RL; Temperature Coefficient: 100ppm/°C; Voltage Rating (DC): 50V; Power Rating: 100mW; Supplier 1: Arrow Electronics; RoHS: Yes; Category: Chip SMD Resistors; Stock 1: 3800000; Pricing 1: 5000=0.00300, 5000=0.00200, 5000=0.00450, 50000=0.00410, 500000=0.00230, 2500000=0.00140 (USD); Case/Package: 0603; Number of Pins: 2; Case Code (Imperial): 0603; Case Code (Metric): 1608; Size Code: 0603; Min Operating Temperature: -55°C; Max Operating Temperature: 155°C; Resistance: 100R; Tolerance: 1%; Resistor Type: Thick Film; Packaging: Tape and Reel; Voltage Rating: 50V; Termination: SMD/SMT; Features: Moisture Resistant; Series: RC; Max Power Dissipation: 100mW; Number of Terminations: 2; Construction: Rectangular; Resistance Tolerance: 1%; Technology: THICK FILM; Length: 1.6mm; Width: 0.8mm; Height: 0.45mm; Depth: 0.8mm; REACH SVHC: Unknown; Lead Free: Lead Free; RoHS Compliant: Yes; Military Standard: Not; Supplier Part Number 1: RC0603FR-07100RL
footprint Res0603
pins: 1, 2

## RC0603FR-07470RL
designator R?, comment 470R
RES SMD 470 OHM 1% 1/10W 0603; Manufacturer: Yageo; Manufacturer Part Number: RC0603FR-07470RL; Power Rating: 100mW; Voltage Rating: 50V; Temperature Coefficient: 100ppm/°C; Working Voltage: 75V; Supplier 1: Digi-Key; Stock 1: 4530601; Pricing 1: 1=0.1, 10=0.023, 100=0.0094, 1000=0.00421, 2500=0.00366 (USD); Case/Package: 0603; Case Code (Metric): 1608; Case Code (Imperial): 0603; Min Operating Temperature: -55°C; Max Operating Temperature: 155°C; Tolerance: 1%; Resistance: 470R; Packaging: Tape and Reel; Package Quantity: 1; Composition: Thick Film; Number of Terminations: 2; Termination: SMD/SMT; Military Standard: Not; Max Power Dissipation: 100mW; Features: Moisture Resistant; Length: 1.6mm; Height: 0.022inch; Width: 0.031inch; Depth: 0.8mm; REACH SVHC: No SVHC; Lead Free: Lead Free; ComponentLink1URL: http://documents.rs-components.com/techlib://itc_doclist_GB.htm?stockno=5047341&src-supplier=RSComponents; ComponentLink1Description: http://documents.rs-components.com/techlib://itc_doclist_GB.htm?stockno=5047341&src-supplier=RSComponents; ComponentLink2URL: http://www.farnell.com/datasheets/1868787.pdf?src-supplier=Element14; ComponentLink2Description: http://www.farnell.com/datasheets/1868787.pdf?src-supplier=Element14; ComponentLink3URL: http://www.farnell.com/datasheets/2167052.pdf?src-supplier=Element14; ComponentLink3Description: http://www.farnell.com/datasheets/2167052.pdf?src-supplier=Element14; ComponentLink4URL: http://www.yageo.com/documents/recent/PYu-RC_Group_51_RoHS_L_10.pdf?src-supplier=Digi-Key; ComponentLink4Description: http://www.yageo.com/documents/recent/PYu-RC_Group_51_RoHS_L_10.pdf?src-supplier=Digi-Key; Supplier Part Number 1: 311-470HRCT-ND
footprint Res0603
pins: 1, 2

## RC0603JR-07330RL
designator R?, comment 330R
RES  SMD 330R 100 mW 0603; Manufacturer: Yageo; Manufacturer Part Number: RC0603JR-07330RL; Power Rating: 100mW; Tolerance: 5%; Voltage Rating (DC): 50V; Temperature Coefficient: 100ppm/°C; Supplier 1: Digi-Key; RoHS: Yes; Category: Chip SMD Resistors; Stock 1: 1074593; Pricing 1: 1=0.10000, 10=0.02000, 100=0.00800, 1000=0.00360, 2500=0.00312 (USD); Case/Package: 0603; Number of Pins: 2; Case Code (Imperial): 0603; Case Code (Metric): 1608; Size Code: 0603; Min Operating Temperature: -55°C; Max Operating Temperature: 155°C; Resistance: 330R; Packaging: Tape and Reel; Voltage Rating: 50V; Package Quantity: 5000; Termination: SMD/SMT; Resistor Type: Thick Film; Features: Moisture Resistant; Series: RC; Max Power Dissipation: 100mW; Number of Terminations: 2; Resistance Tolerance: 5%; Construction: Rectangular; Length: 1.6mm; Width: 0.8mm; Height: 0.45mm; Depth: 0.8mm; REACH SVHC: No SVHC; Lead Free: Lead Free; Military Standard: Not; RoHS Compliant: Yes; Supplier Part Number 1: 311-330GRCT-ND
footprint Res0603
pins: 1, 2

## RT0603CRD0712K1L
designator R?, comment 12.1K
RES SMD 12.1K OHM 1/10W 0603; Manufacturer: Yageo; Manufacturer Part Number: RT0603CRD0712K1L; Resistance: 12.1kR; Tolerance: 0.25%; Temperature Coefficient: 25ppm/°C; Power Rating: 100mW; Voltage Rating: 75V; Voltage Rating (DC): 50V; Supplier 1: Digi-Key; RoHS: Yes; Category: Chip SMD Resistors; Pricing 1: 5000=0.06299 (USD); Case/Package: 0603; Contact Plating: Tin,Matte; Case Code (Metric): 1608; Case Code (Imperial): 0603; Min Operating Temperature: -55°C; Max Operating Temperature: 125°C; Resistor Type: Thin Film; Package Quantity: 5000; Packaging: Tape and Reel; Number of Terminations: 2; Termination: SMD/SMT; Max Power Dissipation: 100mW; Series: RT; Length: 0.063inch; Width: 0.031inch; Height: 0.022inch; Radiation Hardening: No; Lead Free: Lead Free; RoHS Compliant: Yes; ComponentLink1URL: https://datasheet.ciiva.com/2590/pyu-rt-1-to-0-05-rohs-l-5-2590806.pdf?src-supplier=Digi-Key; ComponentLink1Description: https://datasheet.ciiva.com/2590/pyu-rt-1-to-0-05-rohs-l-5-2590806.pdf?src-supplier=Digi-Key; ComponentLink2URL: https://datasheet.ciiva.com/8891/pyu-rt-1-to-0-05-rohs-l-4-8891049.pdf?src-supplier=Avnet; ComponentLink2Description: https://datasheet.ciiva.com/8891/pyu-rt-1-to-0-05-rohs-l-4-8891049.pdf?src-supplier=Avnet; ComponentLink3URL: https://datasheet.ciiva.com/12721/pyu-rt-1-to-0-05-rohs-l-4-12721018.pdf?src-supplier=Mouser; ComponentLink3Description: https://datasheet.ciiva.com/12721/pyu-rt-1-to-0-05-rohs-l-4-12721018.pdf?src-supplier=Mouser; Supplier Part Number 1: RT0603CRD0712K1L-ND
footprint Res0603
pins: 1, 2

## RTT25R18JTE
designator R?, comment 180m
RES SMD ±5% ±200ppm/℃ 0.18Ω 1W 2512; Manufacturer: RALEC; Package: 2512; Tolerance: ±5%; Temperature Coefficient: ±200ppm/℃; Resistance: 0.18Ω; Power(Watts): 1W
footprint RES 2512 (0.033O ±1% 2W ±1800ppm/°C 2512 Low Resistors & Current Sense Resistors - Surface Mount RoHS)
pins: 1, 2

## RVT1E100M0405
designator C?, comment 10uF
CAP ALUM 10uF 25V SMD; Manufacturer: ROQANG; φD: 4mm; L: 5.4mm; Tolerance: ±20%; Operating Temperature: -45℃~+105℃; Rated Voltage: 25V; Capacitance: 10uF
footprint RVT1E100M0405. (10uF 25V 5.4mm SMD)
pins: 1, 2

## SBH11-PBPC-D10-ST-BK
designator J?
CONN HEADER VERT 20POS 2.54MM; Manufacturer: Sullins; Number of Positions: 20; Connector Type: Male Pin; Pitch: 0.1inch; Supplier 1: Digi-Key; Manufacturer Part Number: SBH11-PBPC-D10-ST-BK; RoHS: Yes; Category: Connectors; Stock 1: 32378; Pricing 1: 1=0.54000, 10=0.47500, 80=0.39125, 440=0.34020, 1000=0.28066, 5000=0.24664, 10000=0.24570 (USD); Mount: Through Hole; Color: Black; Contact Plating: Gold; Package Quantity: 1; Number of Rows: 2; Packaging: Tray; Termination: Solder; Series: SBH11; Contact Type: Male Pin; Row Spacing: 0.1inch; Lead Free: Lead Free; RoHS Compliant: Yes; ComponentLink1URL: https://datasheet.ciiva.com/730/sbh11-pbpc-dxx-st-xx-730919.pdf?src-supplier=Digi-Key; ComponentLink1Description: https://datasheet.ciiva.com/730/sbh11-pbpc-dxx-st-xx-730919.pdf?src-supplier=Digi-Key; Supplier Part Number 1: S9172-ND
footprint SBH11-PBPC-D10-ST-BK
pins: 1, 2, 3, 4, 5, 6, 7, 8, 9, 10, 11, 12, 13, 14, 15, 16, 17, 18, 19, 20

## SD36
designator D?
36V 40V Unidirectional 75V 5A SOD-323 TVS ROHS; Manufacturer: MDD (Microdiode Electronics); Voltage - Reverse Standoff (Typ): 36V; Voltage - Breakdown (Min): 40V; Polarity: Unidirectional; Voltage - Clamping (Max) @ Ipp: 75V; Current - Peak Pulse (10/1000μs): 5A
footprint SOD-323 (36V 40V Unidirectional 75V 5A SOD-323 TVS ROHS)
pins: 1 K, 2 A

## SIL03N10-TP
designator Q?
MOSFET N-CH 100V 3A SOT23-6L; Manufacturer: MCC; Supplier 1: Digi-Key; Manufacturer Part Number: SIL03N10-TP; RoHS: No; Category: Uncategorized; Stock 1: 1815; Pricing 1: 1=0.43000, 10=0.32200, 100=0.20060, 500=0.13728, 1000=0.10560 (USD); Supplier Part Number 1: 353-SIL03N10-TPCT-ND
footprint SIL03N10-TP
pins: 1 D, 2 D, 3 G, 4 S, 5 D, 6 D

## SK07-111071ENL
designator J?, comment SK07-111071ENL*
10/100 BASE-TX RJ45 WITH LEDS / INTEGRATED MAGNETICS CONNECTOR; Manufacturer: SAK ELECTRONICS CO.,LTD; OPERATION TEMPERATURE RANGE: 0°C TO +70°C; SHIELD: BRASS; THICKNESS: 0.2mm
footprint SK07- 111071ENL (CONN RJ45 WITH LED AND MAGNETICS)
pins: 1 TD+, 2 TD-, 3, 4, 5 GND, 6, 7 RD-, 8 RD+, L1 ANODE , L2 CATHODE, L3 ANODE , L4 CATHODE, MH1, MH2, MH3, MH4

## SM36
designator D?
5A 75V 40V 36V SOT-23 TVS ROHS; Manufacturer: Leiditech; Value: Custom; Manufacturer Part No: SM36; Package: SOT-23; ComponentLink1Description: LCSC; ComponentLink1URL: https://lcsc.com/product-detail/TVS_Leiditech-SM36_C384875.html
footprint SOT-23 (TRANS NPN 40V 0.6A SOT23)
pins: 1 K, 2 K, 3 A

## SMBJ36A
designator D?
36V 40V Unidirectional 58.1V @ 10.3A 10.3A SMB; Manufacturer: AnBon; Voltage - Reverse Standoff (Typ): 36V; Voltage - Breakdown (Min): 40V; Polarity: Unidirectional; Voltage - Clamping (Max) @ Ipp: 58.1V @ 10.3A; Current - Peak Pulse (10/1000μs): 10.3A
footprint SMBJ36A (36V 40V Unidirectional 58.1V @ 10.3A 10.3A SMB)
pins: 1 K, 2 A

## SN74LVCH8T245PWR
designator U?
IC TRANSLATION TXRX 5.5V 24TSSOP; Manufacturer: Texas Instruments; Number of Channels: 8; Min Supply Voltage: 1.65V; Propagation Delay: 23.8ns; Number of Elements: 1; High Level Output Current: -32mA; Low Level Output Current: 32mA; Logic Function: Transceiver,Inverting,Translator; Polarity: Non-Inverting; Turn-On Delay Time: 32.2ns; Quiescent Current: 20uA; Direction: Bidirectional; Supplier 1: Digi-Key; Manufacturer Part Number: SN74LVCH8T245PWR; RoHS: Yes; Category: Voltage Level Shifters; Stock 1: 7404; Pricing 1: 1=1.57000, 10=1.40400, 25=1.33280, 100=1.09470, 250=1.02328, 500=0.83290, 1000=0.78575 (USD); Mount: Surface Mount; Case/Package: TSSOP; Number of Pins: 24; Weight: 0.003157oz; Contact Plating: Gold; Min Operating Temperature: -40°C; Max Operating Temperature: 85°C; Max Supply Voltage: 5.5V; Packaging: Tape and Reel; Number of Inputs: 8; Package Quantity: 2000; Number of Bits per Element: 8; Number of Bits: 8; Output Current: 32mA; Length: 7.9mm; Width: 4.5mm; Height: 1.05mm; Radiation Hardening: No; REACH SVHC: No SVHC; Lead Free: Lead Free; ComponentLink1URL: https://datasheet.ciiva.com/15086/getdatasheetpartid-298943-15086578.pdf?src-supplier=Verical; ComponentLink1Description: https://datasheet.ciiva.com/15086/getdatasheetpartid-298943-15086578.pdf?src-supplier=Verical; ComponentLink2URL: https://datasheet.ciiva.com/1508/1863654-1508819.pdf?src-supplier=Element14; ComponentLink2Description: https://datasheet.ciiva.com/1508/1863654-1508819.pdf?src-supplier=Element14; ComponentLink3URL: https://datasheet.ciiva.com/1834/sn74lvch8t245-1834828.pdf?src-supplier=Digi-Key; ComponentLink3Description: https://datasheet.ciiva.com/1834/sn74lvch8t245-1834828.pdf?src-supplier=Digi-Key; ComponentLink4URL: https://datasheet.ciiva.com/1834/sn74lvch8t245-1834827.pdf?src-supplier=Digi-Key; ComponentLink4Description: https://datasheet.ciiva.com/1834/sn74lvch8t245-1834827.pdf?src-supplier=Digi-Key; ComponentLink5URL: https://datasheet.ciiva.com/1834/sn74lvch8t245-1834829.pdf?src-supplier=Digi-Key; ComponentLink5Description: https://datasheet.ciiva.com/1834/sn74lvch8t245-1834829.pdf?src-supplier=Digi-Key; ComponentLink6URL: https://datasheet.ciiva.com/14315/sn74lvch8t245-14315784.pdf?src-supplier=Avnet; ComponentLink6Description: https://datasheet.ciiva.com/14315/sn74lvch8t245-14315784.pdf?src-supplier=Avnet; Supplier Part Number 1: 296-21069-1-ND
footprint SN74LVCH8T245PWR
pins: 1 VCCA, 2 DIR, 3 A1, 4 A2, 5 A3, 6 A4, 7 A5, 8 A6, 9 A7, 10 A8, 11 GND, 12 GND, 13 GND, 14 B8, 15 B7, 16 B6, 17 B5, 18 B4, 19 B3, 20 B2, 21 B1, 22 ~{OE}, 23 VCCB, 24 VCCB

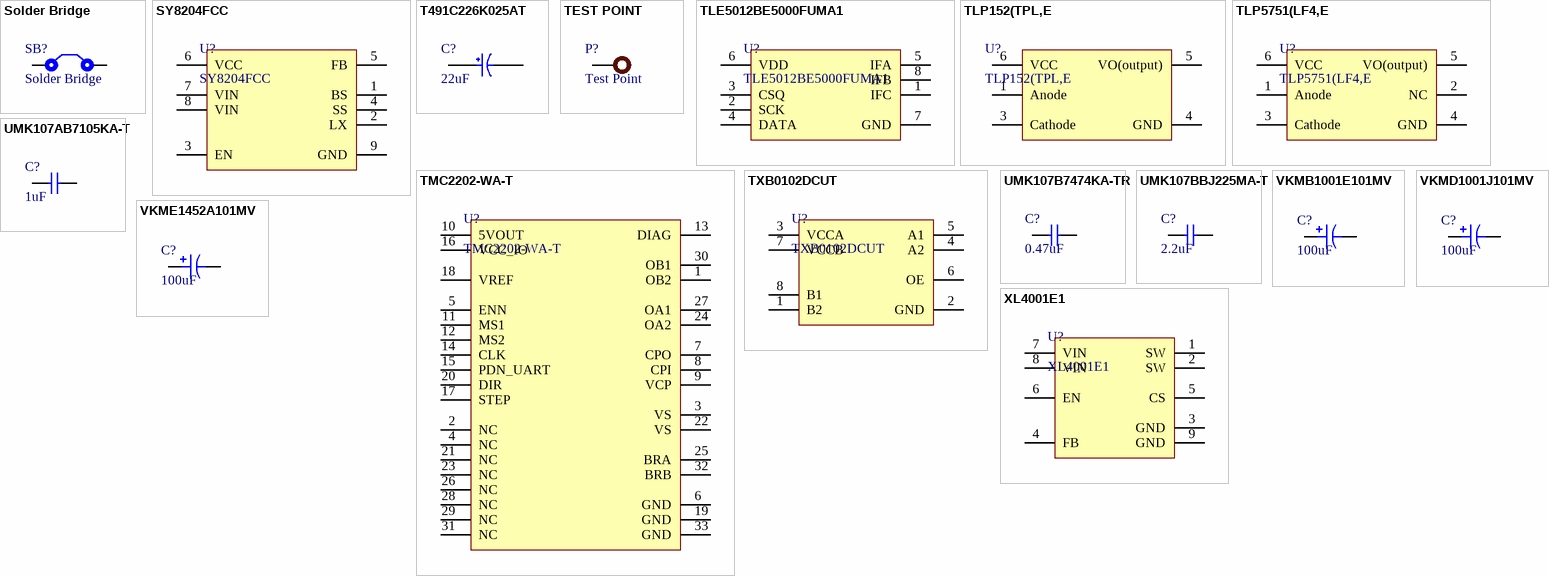
[diagram p2: symbols Solder Bridge to XL4001E1]

## Solder Bridge
designator SB?
Solder Bridge ON
footprint Solder Bridge (Solder Bridge ON)
pins: 1, 2

## SY8204FCC
designator U?
4A 30V SOIC-8_EP_150mil DC-DC Converters ROHS; Manufacturer: Silergy Corp; Value: Custom; Manufacturer Part No: SY8204FCC; Package: SOIC-8; ComponentLink1Description: LCSC; ComponentLink1URL: https://www.lcsc.com/product-detail/DC-DC-Converters_Silergy-Corp-SY8204FCC_C125895.html
footprint SO8E
pins: 1 BS, 2 LX, 3 EN, 4 SS, 5 FB, 6 VCC, 7 VIN, 8 VIN, 9 GND

## T491C226K025AT
designator C?, comment 22uF
CAP TANT 22UF 10% 25V 2312; Manufacturer: KEMET; Manufacturer Part Number: T491C226K025AT; Dielectric Material: Tantalum; ESR (Equivalent Series Resistance): 1.4R; Life (Hours): 2000Hour; Ripple Current: 280mA; Leakage Current: 5.5uA; Dissipation Factor: 6%; Polarity: Polar; Supplier 1: Digi-Key; Stock 1: 17993; Pricing 1: 1=0.82, 10=0.626, 100=0.4479 (USD); Mount: Surface Mount,PCB; Case/Package: Molded; Number of Pins: 2; Case Code (Metric): 6032; Case Code (Imperial): 2412; Min Operating Temperature: -55°C; Max Operating Temperature: 125°C; Capacitance: 22uF; Tolerance: 10%; Voltage Rating: 25V; Packaging: Tape and Reel; Features: General Purpose; Package Quantity: 1; Voltage Rating (DC): 25V; Termination: SMD/SMT; Voltage: 25V; Length: 6mm; Height: 2.5mm; Width: 0.126inch; Depth: 3.2mm; Height - Seated (Max): 0.11inch; Lead Pitch: 2.9mm; Radiation Hardening: No; Lead Free: Lead Free; REACH SVHC: No SVHC; ComponentLink1URL: https://search.kemet.com/component-edge/download/datasheet/T491C226K025AT.pdf?src-supplier=Digi-Key; ComponentLink1Description: https://search.kemet.com/component-edge/download/datasheet/T491C226K025AT.pdf?src-supplier=Digi-Key; ComponentLink2URL: http://www.jameco.com/Jameco/Products/ProdDS/1573951.pdf?src-supplier=Jameco; ComponentLink2Description: http://www.jameco.com/Jameco/Products/ProdDS/1573951.pdf?src-supplier=Jameco; ComponentLink3URL: https://www.alliedelec.com/m/d/1172a60f7bb3eb66344f86e8fb9ddbde.pdf?src-supplier=Allied+Electronics; ComponentLink3Description: https://www.alliedelec.com/m/d/1172a60f7bb3eb66344f86e8fb9ddbde.pdf?src-supplier=Allied+Electronics; ComponentLink4URL: http://www.farnell.com/datasheets/1698764.pdf?src-supplier=Element14; ComponentLink4Description: http://www.farnell.com/datasheets/1698764.pdf?src-supplier=Element14; ComponentLink5URL: https://api.kemet.com/component-edge/download/datasheet/T491C226K025AT.pdf?src-supplier=Digi-Key; ComponentLink5Description: https://api.kemet.com/component-edge/download/datasheet/T491C226K025AT.pdf?src-supplier=Digi-Key; ComponentLink6URL: http://www.farnell.com/datasheets/1923792.pdf?src-supplier=Element14; ComponentLink6Description: http://www.farnell.com/datasheets/1923792.pdf?src-supplier=Element14; ComponentLink7URL: https://www.distrelec.biz/Web/Downloads/_t/ds/KEM_T2005_T491_eng_tds.pdf?mime=application%2Fpdf&src-supplier=Distrelec; ComponentLink7Description: https://www.distrelec.biz/Web/Downloads/_t/ds/KEM_T2005_T491_eng_tds.pdf?mime=application%2Fpdf&src-supplier=Distrelec; Supplier Part Number 1: 399-3746-1-ND
footprint T491C226K025AT
pins: 1, 2

## TEST POINT
designator P?, comment Test Point
Test Point ON
footprint TEST POINT
pins: 1

## TLE5012BE5000FUMA1
designator U?
MAGNETIC ANGLE SENSOR; Manufacturer: Infineon; Interface: SPI,PWM; Supplier 1: RSComponents; Manufacturer Part Number: TLE5012BE5000; RoHS: Yes; Category: Magnetic Sensors; Number of Pins: 8; Series: TLE5012; Package Quantity: 2500; Packaging: Tape and Reel; RoHS Compliant: Yes; ComponentLink1URL: http://www.mouser.com/ds/2/196/Infineon-TLE5012B_Exxxx-DS-v02_00-en-540142.pdf?src-supplier=Mouser; ComponentLink1Description: http://www.mouser.com/ds/2/196/Infineon-TLE5012B_Exxxx-DS-v02_00-en-540142.pdf?src-supplier=Mouser; Supplier Part Number 1: 2238590
footprint TLE5012BE5000FUMA1
pins: 1 IFC, 2 SCK, 3 CSQ, 4 DATA, 5 IFA, 6 VDD, 7 GND, 8 IFB

## TLP152(TPL,E
designator U?
OPTOISO 3.75KV GATE DRIVER 6SO-5; Manufacturer: Toshiba; Number of Channels: 1; Propagation Delay: 165ns; Max Power Dissipation: 260mW; Direction: Unidirectional; Turn-On Delay Time: 190ns; Fall Time: 22ns; Forward Voltage: 1.57V; Output Current: 2.5A; Forward Current: 10mA; Rise Time: 18ns; High Level Output Current: 2A; Pulse Width Distortion (PWD): 50ns; Output Type: TOTEM POLE; Input Type: DC; Supplier 1: Digi-Key; Manufacturer Part Number: TLP152(TPL,E; RoHS: No; Category: Optocouplers; Pricing 1: 1=1.34000, 10=0.84800, 100=0.62750, 500=0.57664, 1000=0.48000 (USD); Mount: Surface Mount; Case/Package: SO; Number of Pins: 5; Min Operating Temperature: -40°C; Max Operating Temperature: 100°C; Packaging: Tape and Reel; Package Quantity: 3000; Low Level Output Current: 2A; Max Output Current: 2.5A; Series: -; RoHS Compliant: No; ComponentLink1URL: https://datasheet.ciiva.com/41848/tlp152-datasheet-en-20120914-41848928.pdf?src-supplier=Digi-Key; ComponentLink1Description: https://datasheet.ciiva.com/41848/tlp152-datasheet-en-20120914-41848928.pdf?src-supplier=Digi-Key; Supplier Part Number 1: TLP152(TPLECT-ND
footprint TLP152(TPL,E
pins: 1 Anode, 3 Cathode, 4 GND, 5 VO(output), 6 VCC

## TLP5751(LF4,E
designator U?
Optocoupler DC 1-CH DC-OUT 6-Pin SOIC Bulk; Manufacturer: Toshiba; Manufacturer Part Number: TLP5751(LF4E; Supplier 1: Avnet; Pricing 1: 125=1.02510, 250=0.99830, 500=0.95140, 750=0.92460, 1000=0.90450, 1250=0.87770, 12500=0.85760 (USD); Supplier Part Number 1: TLP5751(LF4,E
footprint TLP5751(LF4,E
pins: 1 Anode, 2 NC, 3 Cathode, 4 GND, 5 VO(output), 6 VCC

## TMC2202-WA-T
designator U?
IC MTR DRV BIPOLAR 5.5-36V 32QFN; Manufacturer: Trinamic; Logic Function: AND GATE; Interface: UART; Output Current: 1.2A; Supplier 1: Digi-Key; Manufacturer Part Number: TMC2202-WA-T; Stock 1: 10; Pricing 1: 1=2.46000, 50=2.21000, 100=1.95000, 500=1.69000, 1000=1.63500 (USD); Mount: Surface Mount; Case/Package: QFN; Min Operating Temperature: -40°C; Max Operating Temperature: 125°C; Packaging: Cut Tape; ComponentLink1URL: https://www.trinamic.com/fileadmin/assets/Products/ICs_Documents/TMC220x_TMC222x_datasheet_Rev1.05.pdf?src-supplier=Digi-Key; ComponentLink1Description: https://www.trinamic.com/fileadmin/assets/Products/ICs_Documents/TMC220x_TMC222x_datasheet_Rev1.05.pdf?src-supplier=Digi-Key; Supplier Part Number 1: 1460-1272-1-ND
footprint 32-QFN (5x5)
pins: 1 OB2, 2 NC, 3 VS, 4 NC, 5 ENN, 6 GND, 7 CPO, 8 CPI, 9 VCP, 10 5VOUT, 11 MS1, 12 MS2, 13 DIAG, 14 CLK, 15 PDN_UART, 16 VCC_IO, 17 STEP, 18 VREF, 19 GND, 20 DIR, 21 NC, 22 VS, 23 NC, 24 OA2, 25 BRA, 26 NC, 27 OA1, 28 NC, 29 NC, 30 OB1, 31 NC, 32 BRB, 33 GND